# Altium schematic symbol library lri_symbols_connectors.SchLib: 2 symbols
Pins are listed as number, name and electrical type; pins without a type are passive.

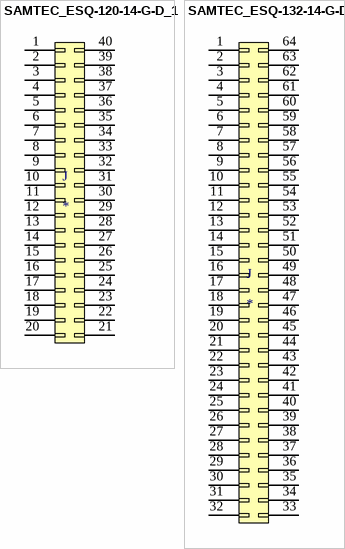
[diagram p0: symbols SAMTEC_ESQ-120-14-G-D_1 to SAMTEC_ESQ-132-14-G-D]

## SAMTEC_ESQ-120-14-G-D_1
designator J  (mechanical)
.100in/2.54mm Elevated Socket Strip Receptacle Square Tail, 40 Pin, 2 Row, 20µin Gold/Flash, .435in Ht, .480in Tail; Manufacturer: Samtec; Manufacturer Lifecycle Status: PRODUCTION; Manufacturer Part Number: ESQ-120-14-G-D-LL-020; Connector Type: Receptacle, Socket; Contact Resistance: 10mΩ; Current Rating: 6.9A; Max Voltage Rating (AC): 550V; Number of Contacts: 40; Pitch: 2.54mm; Category: Board to Board Connectors; Color: Black; Contact Material: Bronze; Contact Plating: Gold; Depth: 4.95mm; Gender: Receptacle; Housing Color: Black; Housing Material: Polyester; Length: 81.79mm; Max Current Rating: 6.9A; Max Operating Temperature: 125°C; Min Operating Temperature: -55°C; Mounting Technology: Through Hole; Pins: 40; Number of Positions: 40; Number of Rows: 2; Orientation: Vertical; Radiation Hardening: No; REACH SVHC: Unaffected; RoHS: Compliant; Row Spacing: 2.54mm; Termination: Solder; Lifecycle Status: Production
footprint SAMTEC_ESQ-120-14-G-D (Elevated Socket Strip, 0.100" Pitch, PC/104 bus connector)
pins: 1, 2, 3, 4, 5, 6, 7, 8, 9, 10, 11, 12, 13, 14, 15, 16, 17, 18, 19, 20, 21, 22, 23, 24, 25, 26, 27, 28, 29, 30, 31, 32, 33, 34, 35, 36, 37, 38, 39, 40

## SAMTEC_ESQ-132-14-G-D
designator J  (mechanical)
.100in/2.54mm Elevated Socket Strip Receptacle Square Tail, 64 Pin, 2 Row, 20µin Gold/Flash, .435in Ht, .480in Tail; Manufacturer: Samtec; Manufacturer Lifecycle Status: PRODUCTION; Manufacturer Part Number: ESQ-132-14-G-D; Connector Type: Receptacle, Socket; Contact Resistance: 10mΩ; Current Rating: 6.9A; Max Voltage Rating (AC): 550V; Number of Contacts: 64; Pitch: 2.54mm; Category: Board to Board Connectors; Color: Black; Contact Material: Bronze; Contact Plating: Gold; Depth: 4.95mm; Gender: Receptacle; Housing Color: Black; Housing Material: Polyester; Length: 81.79mm; Max Current Rating: 6.9A; Max Operating Temperature: 125°C; Min Operating Temperature: -55°C; Mounting Technology: Through Hole; Pins: 64; Number of Positions: 64; Number of Rows: 2; Orientation: Vertical; Radiation Hardening: No; REACH SVHC: Unaffected; RoHS: Compliant; Row Spacing: 2.54mm; Termination: Solder
footprint SAMTEC_ESQ-132-14-G-D (Elevated Socket Strip, 0.100" Pitch, PC/104 bus connector)
pins: 1, 2, 3, 4, 5, 6, 7, 8, 9, 10, 11, 12, 13, 14, 15, 16, 17, 18, 19, 20, 21, 22, 23, 24, 25, 26, 27, 28, 29, 30, 31, 32, 33, 34, 35, 36, 37, 38, 39, 40, 41, 42, 43, 44, 45, 46, 47, 48, 49, 50, 51, 52, 53, 54, 55, 56, 57, 58, 59, 60, 61, 62, 63, 64